# Altium footprint library Footprint-Lib-PhilsLab.PcbLib: 351 footprints (part 13 of 22)
Each footprint in its own frame and in the unit in brackets; x right, y up, seen from the top. Pads: shape width x height; smd on the part's side, far side on the other; paste and mask are expansions set on the pad; w line width, h text height; cw(c..) or ccw(c..) is an arc to the next point about the centre after c.
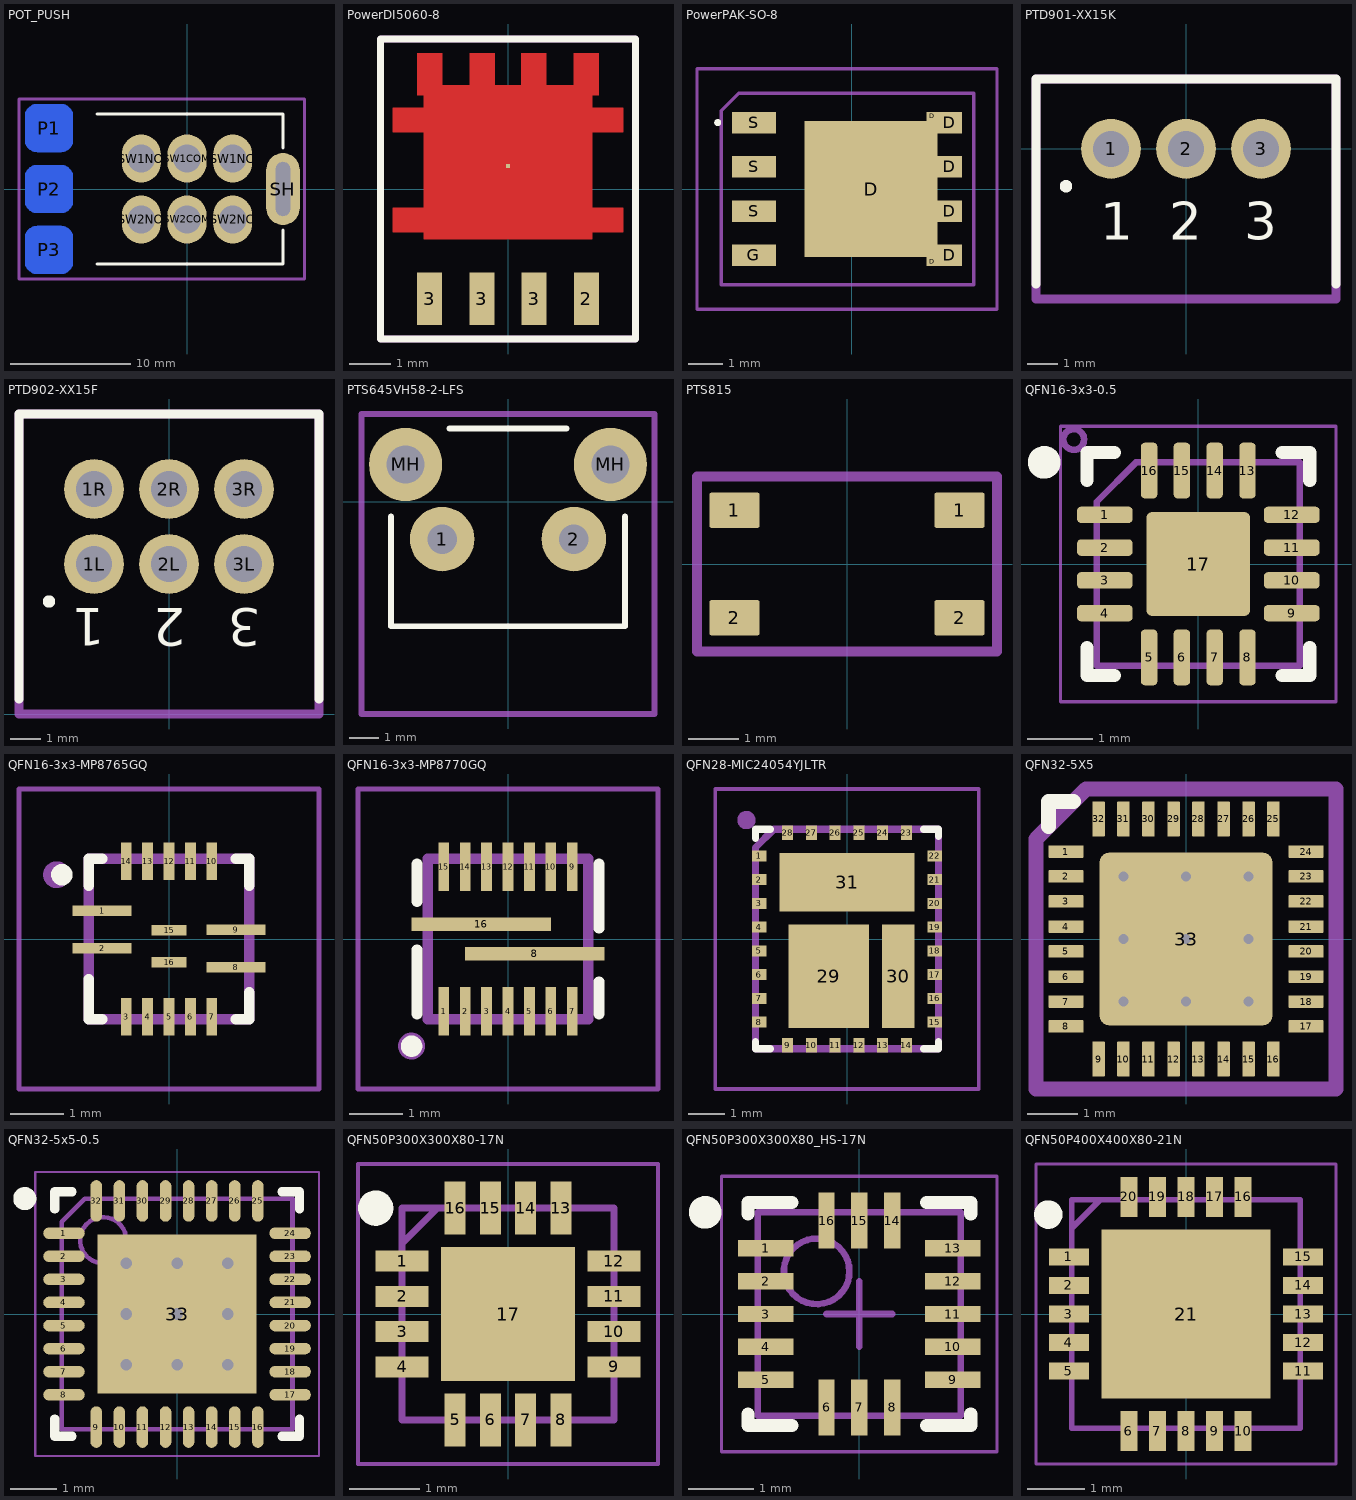
[diagram p12: the footprints below, top view; thin cyan lines are the x and y axes]

## POT_PUSH [mm]
pads (10):
  rrect50% 4x4 smd far side: P1(-11.5,5.08) P2(-11.5,0) P3(-11.5,-5.08)
  oval 2.8x6 hole 1.2 slot 4.5 at 90 deg: SH(8,0)
  oval 3.25x4 hole 2.3: SW1COM(0,2.54) SW1NC(3.81,2.54) SW1NO(-3.81,2.54) SW2COM(0,-2.54) SW2NC(3.81,-2.54) SW2NO(-3.81,-2.54)
Top Overlay:
  lines w0.254: -7.5,-6.25 8,-6.25 8,-3.4 ; -7.5,6.25 8,6.25 8,3.4
Mechanical 13:
  lines w0.254: -14,-7.5 9.8,-7.5 9.8,7.5 -14,7.5 -14,0.35 -14,-7.5
  text "'.Designator'" at -9.097,-0.375 h1.5
3D body "Potentiometer_push_pull.STEP": height 20.52, standoff -3.82, extent -38.199,-8.89 8.283,8.89

## PowerDI5060-8 [mm]
pads (5):
  rect 0.1x0.1 smd paste-0.1 mask-0.1: 1(0,0.56)
  rect 0.61x1.27 smd: 2(1.905,-2.66) 3(-1.905,-2.66) 3(-0.635,-2.66) 3(0.635,-2.66)
Top Layer:
  region: -2.8,-1.045 -2.05,-1.045 -2.05,-1.22 2.05,-1.22 2.05,-1.045 2.8,-1.045 2.8,-0.445 2.05,-0.445 2.05,1.38 2.8,1.38 2.8,1.98 2.05,1.98 2.05,2.28 2.2,2.28 2.2,3.305 1.6,3.305 1.6,2.53 0.925,2.53 0.925,3.305 0.325,3.305 0.325,2.53 -0.325,2.53 -0.325,3.305 -0.925,3.305 -0.925,2.53 -1.6,2.53 -1.6,3.305 -2.2,3.305 -2.2,2.28 -2.05,2.28 -2.05,1.98 -2.8,1.98 -2.8,1.38 -2.05,1.38 -2.05,-0.445 -2.8,-0.445
Top Overlay:
  lines w0.175: -3.1,-3.64 -3.1,3.65 3.1,3.65 3.1,-3.64 -3.1,-3.64
Mechanical 13:
  lines w0.175: -3.1,-3.64 -3.1,3.65 3.1,3.65 3.1,-3.64 -3.1,-3.64
  text "'.Designator'" at -4.532,-0.333 h0.8
  text "D" at -0.267,1.65 h0.8
  text "S" at -2.167,-3.025 h0.8
  text "S" at -0.892,-3.025 h0.8
  text "S" at 0.358,-3.025 h0.8
  text "G" at 1.633,-3.025 h0.8
3D body "PowerDI5060-8.stp": height 1, standoff 0.01, extent -2.575,-3.09 2.575,3.06

## PowerPAK-SO-8 [mm]
pads (11):
  rect 3.81x3.91 smd: D(0.55,0)
  rect 0.31x0.255 smd: D(2.3,-2.083) D(2.3,2.083)
  rect 0.71x0.61 smd: D(2.81,-1.905) D(2.81,-0.635) D(2.81,0.635) D(2.81,1.905)
  rect 1.27x0.61 smd: G(-2.81,-1.905) S(-2.81,-0.635) S(-2.81,0.635) S(-2.81,1.905)
Top Overlay:
  lines w0.1: -3.9,1.905 ccw(c-3.85,1.905) -3.8,1.905 ccw(c-3.85,1.905) -3.9,1.905
Mechanical 13:
  lines w0.1: -3.75,-2.75 -3.75,2.25 -3.25,2.75 3.5,2.75 3.5,-2.75 -3.75,-2.75
  text "'.Designator'" at -5.84,-0.925 h1
Mechanical 15:
  lines w0.1: -4.445,-3.45 -4.445,3.45 4.165,3.45 4.165,-3.45 -4.445,-3.45
3D body "SIR500DP-T1-RE3.stp": height 1.27, standoff 0, extent -3.384,-2.45 3.104,2.45

## PTD901-XX15K [mm]
pads (3):
  round 2 hole 1.2 mask+0.07: 1(-2.5,0) 2(0,0) 3(2.5,0)
Top Overlay:
  circle w0.25: c-4,-1.25 r0.083
  lines w0.3: -5,-4.5 -5,2.318 5,2.318 5,-4.5
  text "1" at -2.858,-3.025 h1.25
  text "2" at -0.567,-3.025 h1.25
  text "3" at 1.933,-3.025 h1.25
Mechanical 13:
  lines w0.3: -5,-5 -5,2.318 5,2.318 5,-5 -5,-5
  text "'.Designator'" at -7.231,-2.837 h1.25
3D body "PTD901.step": height 11.32, standoff -3.49, extent -4.75,-20 4.75,2.061

## PTD902-XX15F [mm]
pads (6):
  round 2 hole 1.2 mask+0.07: 1L(-2.5,5) 1R(-2.5,7.5) 2L(0,5) 2R(0,7.5) 3L(2.5,5) 3R(2.5,7.5)
Top Overlay:
  circle w0.25: c-4,3.75 r0.083
  lines w0.3: -5,0.5 -5,10 5,10 5,0.5
  text "1" at -2.142,3.525 h1.25
  text "2" at 0.567,3.525 h1.25
  text "3" at 3.067,3.525 h1.25
Mechanical 13:
  lines w0.3: -5,0 -5,10 5,10 5,0 -5,0
  text "'.Designator'" at -7.231,-1.087 h1.25
3D body "ptd902-xx15f-xxxx.stp": height 11.36, standoff -3.49, extent -4.8,-15 4.8,9.65

## PTS645VH58-2-LFS [mm]
pads (4):
  round 2.2 hole 1: 1(-2.25,-1.275) 2(2.25,-1.275)
  round 2.5 hole 1.3: MH(-3.5,1.275) MH(3.5,1.275)
Top Overlay:
  lines w0.2: -4,-0.5 -4,-4.25 4,-4.25 4,-0.5 ; -2,2.5 2,2.5
Mechanical 13:
  lines w0.2: -5,-7.25 -5,3 0,3 5,3 5,-7.25 -4.75,-7.25 -5,-7.25
  text ".Designator" at -4.998,-0.333 h1
3D body "PTS645VH58-2LFS.stp": height 7.42, standoff -3.93, extent -4.251,-7.075 4.253,2.925

## PTS815 [mm]
pads (4):
  rrect10% 1x0.7 smd mask+0: 1(-2.25,1.075) 1(2.25,1.075) 2(-2.25,-1.075) 2(2.25,-1.075)
Mechanical 13:
  lines w0.2: -3,-1.75 -3,1.75 3,1.75 3,-1.75 -3,-1.75
  text "'.Designator'" at -5.84,-0.925 h1
3D body "PTS815SJM250SMTRLFS.stp": height 2.5, standoff 0, extent -2.25,-1.6 2.25,1.6

## QFN16-3x3-0.5 [mm] "QFN, 16-Leads, Body 3.00x3.00mm, Pitch 0.50mm, Thermal Pad 1.58x1.58mm, IPC Medium Density"
height 1
pads (17):
  rrect50% 0.85x0.25 smd mask+0.05: 1(-1.425,0.75) 2(-1.425,0.25) 3(-1.425,-0.25) 4(-1.425,-0.75) 9(1.425,-0.75) 10(1.425,-0.25) 11(1.425,0.25) 12(1.425,0.75)
  rrect50% 0.25x0.85 smd mask+0.05: 5(-0.75,-1.425) 6(-0.25,-1.425) 7(0.25,-1.425) 8(0.75,-1.425) 13(0.75,1.425) 14(0.25,1.425) 15(-0.25,1.425) 16(-0.75,1.425)
  rrect10% 1.58x1.58 smd mask+0.05: 17(0,0)
Top Overlay:
  circle w0.25: c-2.35,1.55 r0.125
  lines w0.2: -1.7,-1.275 -1.7,-1.7 -1.275,-1.7 ; -1.7,1.275 -1.7,1.7 -1.275,1.7 ; 1.275,-1.7 1.7,-1.7 1.7,-1.275 ; 1.275,1.7 1.7,1.7 1.7,1.275
Mechanical 13:
  circle w0.1: c-1.9,1.9 r0.158
  lines w0.1: -1.55,-1.55 1.55,-1.55 1.55,1.55 -0.95,1.55 -1.55,0.95 -1.55,-1.55
  text "'.Designator'" at -6.315,-1.4 h1
Mechanical 15:
  lines w0.05: -2.1,-2.1 -2.1,2.1 2.1,2.1 2.1,-2.1 -2.1,-2.1
  lines w0.1: -0.5,0 0.5,0 ; 0,-0.5 0,0.5
3D body "QFN16-3x3-0.5.step": height 1, standoff 0, extent -1.551,-1.551 1.551,1.551

## QFN16-3x3-MP8765GQ [mm]
pads (16):
  rect 1.1x0.2 smd: 1(-1.25,0.525) 2(-1.25,-0.175) 8(1.25,-0.525) 9(1.25,0.175)
  rect 0.2x0.7 smd: 3(-0.8,-1.45) 4(-0.4,-1.45) 5(0,-1.45) 6(0.4,-1.45) 7(0.8,-1.45) 10(0.8,1.45) 11(0.4,1.45) 12(0,1.45) 13(-0.4,1.45) 14(-0.8,1.45)
  rect 0.65x0.2 smd: 15(0,0.165) 16(0,-0.435)
Top Overlay:
  lines w0.2: -1.5,-0.75 -1.5,-1.5 -1.25,-1.5 ; -1.5,1 -1.5,1.5 -1.25,1.5 ; 1.25,-1.5 1.5,-1.5 1.5,-1 ; 1.25,1.5 1.5,1.5 1.5,1 ; -2.1,1.2 ccw(c-2,1.2) -1.9,1.2 ccw(c-2,1.2) -2.1,1.2
Mechanical 13:
  circle w0.3: c-2.1,1.2 r0.1
  lines w0.2: -1.5,-1.5 -1.5,1.5 1.5,1.5 1.5,-1.5 -1.5,-1.5
  text "'.Designator'" at -5.815,-0.9 h1
Mechanical 15:
  lines w0.1: -2.8,-2.8 -2.8,2.8 2.8,2.8 2.8,-2.8 -2.8,-2.8
3D body "MP8765GQ-Z.stp": height 1.1, standoff 0, extent -1.5,-1.5 1.5,1.5

## QFN16-3x3-MP8770GQ [mm]
pads (16):
  rect 0.2x0.9 smd: 1(-1.2,-1.35) 2(-0.8,-1.35) 3(-0.4,-1.35) 4(0,-1.35) 5(0.4,-1.35) 6(0.8,-1.35) 7(1.2,-1.35) 9(1.2,1.35) 10(0.8,1.35) 11(0.4,1.35) 12(0,1.35) 13(-0.4,1.35) 14(-0.8,1.35) 15(-1.2,1.35)
  rect 2.6x0.25 smd: 8(0.5,-0.275) 16(-0.5,0.275)
Top Overlay:
  lines w0.2: -1.7,-1.4 -1.7,-0.2 ; -1.7,0.7 -1.7,1.4 ; 1.7,-1.4 1.7,-0.8 ; 1.7,0.2 1.7,1.4 ; -1.9,-2 cw(c-1.8,-2) -1.7,-2 cw(c-1.8,-2) -1.9,-2
Mechanical 13:
  circle w0.3: c-1.801,-1.998 r0.1
  lines w0.2: -1.5,-1.5 1.5,-1.5 1.5,1.5 -1.5,1.5 -1.5,-1.5
  text "'.Designator'" at -5.815,-0.9 h1
Mechanical 15:
  lines w0.1: -2.8,-2.8 2.8,-2.8 2.8,2.8 -2.8,2.8 -2.8,-2.8
3D body "MP8770CGQ.step": height 0.86, standoff 0.01, extent -1.5,-1.5 1.5,1.5

## QFN28-MIC24054YJLTR [mm]
pads (31):
  rect 0.4x0.3 smd: 1(-2.4,2.275) 2(-2.4,1.625) 3(-2.4,0.975) 4(-2.4,0.325) 5(-2.4,-0.325) 6(-2.4,-0.975) 7(-2.4,-1.625) 8(-2.4,-2.275) 15(2.4,-2.275) 16(2.4,-1.625) 17(2.4,-0.975) 18(2.4,-0.325) 19(2.4,0.325) 20(2.4,0.975) 21(2.4,1.625) 22(2.4,2.275)
  rect 0.3x0.4 smd: 9(-1.625,-2.9) 10(-0.975,-2.9) 11(-0.325,-2.9) 12(0.325,-2.9) 13(0.975,-2.9) 14(1.625,-2.9) 23(1.625,2.9) 24(0.975,2.9) 25(0.325,2.9) 26(-0.325,2.9) 27(-0.975,2.9) 28(-1.625,2.9)
  rect 2.2x2.83 smd: 29(-0.5,-1.015)
  rect 0.9x2.83 smd: 30(1.4,-1.015)
  rect 3.7x1.6 smd: 31(0,1.55)
Top Overlay:
  lines w0.2: -2.5,-2.8 -2.5,-3 -2.1,-3 ; -2.5,2.75 -2.5,3 -2.1,3 ; 2.1,-3 2.5,-3 2.5,-2.8 ; 2.1,3 2.5,3 2.5,2.8
Mechanical 13:
  circle w0.3: c-2.75,3.25 r0.1
  lines w0.2: -2.5,-3 2.5,-3 2.5,3 -2,3 -2.5,2.5 -2.5,-3
  text "'.Designator'" at -5.815,-0.9 h1
Mechanical 15:
  lines w0.1: -3.6,-4.1 -3.6,4.1 3.6,4.1 3.6,-4.1 -3.6,-4.1
3D body "MIC24054YJL-TR.stp": height 1, standoff 0, extent -2.5,-3 2.5,3

## QFN32-5X5 [mm]
pads (33):
  rrect10% 0.7x0.25 smd mask+0.05: 1(-2.4,1.75) 2(-2.4,1.25) 3(-2.4,0.75) 4(-2.4,0.25) 5(-2.4,-0.25) 6(-2.4,-0.75) 7(-2.4,-1.25) 8(-2.4,-1.75) 17(2.4,-1.75) 18(2.4,-1.25) 19(2.4,-0.75) 20(2.4,-0.25) 21(2.4,0.25) 22(2.4,0.75) 23(2.4,1.25) 24(2.4,1.75)
  rrect10% 0.25x0.7 smd mask+0.05: 9(-1.75,-2.4) 10(-1.25,-2.4) 11(-0.75,-2.4) 12(-0.25,-2.4) 13(0.25,-2.4) 14(0.75,-2.4) 15(1.25,-2.4) 16(1.75,-2.4) 25(1.75,2.4) 26(1.25,2.4) 27(0.75,2.4) 28(0.25,2.4) 29(-0.25,2.4) 30(-0.75,2.4) 31(-1.25,2.4) 32(-1.75,2.4)
  rrect10% 3.45x3.45 smd mask+0.07: 33(0,0)
via 1.25,-1.25 diameter 0.65 hole 0.2
via 1.25,0 diameter 0.65 hole 0.2
via 1.25,1.25 diameter 0.65 hole 0.2
via -1.25,1.25 diameter 0.65 hole 0.2
via -1.25,0 diameter 0.65 hole 0.2
via -1.25,-1.25 diameter 0.65 hole 0.2
via 0,-1.25 diameter 0.65 hole 0.2
via 0,1.25 diameter 0.65 hole 0.2
via 0,0 diameter 0.65 hole 0.2
Top Overlay:
  lines w0.3: -2.75,2.25 -2.75,2.75 -2.25,2.75
Mechanical 13:
  lines w0.3: -3,-3 3,-3 3,3 -2,3 -3,2 -3,-1.75 -3,-3
  text "'.Designator'" at -5.84,-0.925 h1
3D body "QFN32-5x5.step": height 0.85, standoff 0, extent -2.5,-2.5 2.5,2.5

## QFN32-5x5-0.5 [mm]
height 1
pads (33):
  oval 0.9x0.25 smd mask+0.05: 1(-2.45,1.75) 2(-2.45,1.25) 3(-2.45,0.75) 4(-2.45,0.25) 5(-2.45,-0.25) 6(-2.45,-0.75) 7(-2.45,-1.25) 8(-2.45,-1.75) 17(2.45,-1.75) 18(2.45,-1.25) 19(2.45,-0.75) 20(2.45,-0.25) 21(2.45,0.25) 22(2.45,0.75) 23(2.45,1.25) 24(2.45,1.75)
  oval 0.25x0.9 smd mask+0.05: 9(-1.75,-2.45) 10(-1.25,-2.45) 11(-0.75,-2.45) 12(-0.25,-2.45) 13(0.25,-2.45) 14(0.75,-2.45) 15(1.25,-2.45) 16(1.75,-2.45) 25(1.75,2.45) 26(1.25,2.45) 27(0.75,2.45) 28(0.25,2.45) 29(-0.25,2.45) 30(-0.75,2.45) 31(-1.25,2.45) 32(-1.75,2.45)
  rect 3.45x3.45 smd mask+0.05: 33(0,0)
via -1.1,1.1 diameter 0.6 hole 0.25
via 0,1.1 diameter 0.6 hole 0.25
via 1.1,1.1 diameter 0.6 hole 0.25
via -1.1,0 diameter 0.6 hole 0.25
via 0,0 diameter 0.6 hole 0.25
via 1.1,0 diameter 0.6 hole 0.25
via -1.1,-1.1 diameter 0.6 hole 0.25
via 0,-1.1 diameter 0.6 hole 0.25
via 1.1,-1.1 diameter 0.6 hole 0.25
Top Overlay:
  circle w0.25: c-3.3,2.5 r0.125
  lines w0.2: -2.65,-2.275 -2.65,-2.65 -2.275,-2.65 ; -2.65,2.275 -2.65,2.65 -2.275,2.65 ; 2.275,-2.65 2.65,-2.65 2.65,-2.275 ; 2.275,2.65 2.65,2.65 2.65,2.275
Mechanical 13:
  circle w0.1: c-1.6,1.6 r0.5
  lines w0.1: -2.5,-2.5 -2.5,2 -2,2.5 2.5,2.5 2.5,-2.5 -2.5,-2.5
  text "'.Designator'" at -6.315,-1.4 h1
Mechanical 15:
  lines w0.05: -3.075,-3.075 -3.075,3.075 3.075,3.075 3.075,-3.075 -3.075,-3.075
  lines w0.1: -0.5,0 0.5,0 ; 0,-0.5 0,0.5
3D body "QFN32-5x5-0.5.step": height 1, standoff 0, extent -2.501,-2.501 2.501,2.501

## QFN50P300X300X80-17N [mm]
pads (17):
  rect 0.75x0.3 smd: 1(-1.5,0.75) 2(-1.5,0.25) 3(-1.5,-0.25) 4(-1.5,-0.75) 9(1.5,-0.75) 10(1.5,-0.25) 11(1.5,0.25) 12(1.5,0.75)
  rect 0.3x0.75 smd: 5(-0.75,-1.5) 6(-0.25,-1.5) 7(0.25,-1.5) 8(0.75,-1.5) 13(0.75,1.5) 14(0.25,1.5) 15(-0.25,1.5) 16(-0.75,1.5)
  rect 1.9x1.9 smd: 17(0,0)
Top Overlay:
  circle w0.25: c-1.875,1.5 r0.125
Mechanical 13:
  lines w0.1: -1.5,1 -1,1.5 ; -1.5,-1.5 1.5,-1.5 1.5,1.5 -1.5,1.5 -1.5,-1.5
  text "'.Designator'" at -6.315,-1.4 h1
Mechanical 15:
  lines w0.05: -2.125,-2.125 2.125,-2.125 2.125,2.125 -2.125,2.125 -2.125,-2.125
3D body "MAX25202SATEA_VY+.stp": height 0.8, standoff 0, extent -1.55,-1.55 1.55,1.55

## QFN50P300X300X80_HS-17N [mm] "QFN, 16-Leads, Body 3.00x3.00mm, Pitch 0.50mm, Thermal Pad 1.00x1.00mm, IPC Medium Density"
height 0.8
pads (16):
  rect 0.85x0.25 smd mask+0.05: 1(-1.425,1) 2(-1.425,0.5) 3(-1.425,0) 4(-1.425,-0.5) 5(-1.425,-1) 9(1.425,-1) 10(1.425,-0.5) 11(1.425,0) 12(1.425,0.5) 13(1.425,1)
  rect 0.25x0.85 smd mask+0.05: 6(-0.5,-1.425) 7(0,-1.425) 8(0.5,-1.425) 14(0.5,1.425) 15(0,1.425) 16(-0.5,1.425)
Top Overlay:
  circle w0.25: c-2.35,1.55 r0.125
  lines w0.2: -1.7,-1.525 -1.7,-1.7 -1.025,-1.7 ; -1.7,1.525 -1.7,1.7 -1.025,1.7 ; 1.025,-1.7 1.7,-1.7 1.7,-1.525 ; 1.025,1.7 1.7,1.7 1.7,1.525
Mechanical 13:
  circle w0.1: c-0.65,0.65 r0.5
  lines w0.1: -1.55,-1.55 1.55,-1.55 1.55,1.55 -1.55,1.55 -1.55,-1.55
  text "'.Designator'" at -5.84,-0.925 h1
Mechanical 15:
  lines w0.05: -2.1,-2.1 2.1,-2.1 2.1,2.1 -2.1,2.1 -2.1,-2.1
  lines w0.1: -0.5,0 0.5,0 ; 0,-0.5 0,0.5
3D body "IAM-20380.STEP": height 0.81, standoff 0.01, extent -1.5,-1.5 1.5,1.5

## QFN50P400X400X80-21N [mm]
pads (21):
  rect 0.7x0.3 smd mask+0.15: 1(-2.05,1) 2(-2.05,0.5) 3(-2.05,0) 4(-2.05,-0.5) 5(-2.05,-1) 11(2.05,-1) 12(2.05,-0.5) 13(2.05,0) 14(2.05,0.5) 15(2.05,1)
  rect 0.3x0.7 smd mask+0.15: 6(-1,-2.05) 7(-0.5,-2.05) 8(0,-2.05) 9(0.5,-2.05) 10(1,-2.05) 16(1,2.05) 17(0.5,2.05) 18(0,2.05) 19(-0.5,2.05) 20(-1,2.05)
  rect 2.95x2.95 smd mask+0.15: 21(0,0)
Top Overlay:
  circle w0.25: c-2.409,1.739 r0.125
Mechanical 13:
  lines w0.1: -2,1.5 -1.5,2 ; -2,-2 2,-2 2,2 -2,2 -2,-2
  text "'.Designator'" at -6.315,-1.4 h1
Mechanical 15:
  lines w0.05: -2.625,-2.625 2.625,-2.625 2.625,2.625 -2.625,2.625 -2.625,-2.625
3D body "MAX17633BATP+.stp": height 0.8, standoff 0, extent -2.05,-2.05 2.05,2.05